# Altium schematic symbol library 2020-12-08_05-20-47.SchLib: 2 symbols
Pins are listed as number, name and electrical type; pins without a type are passive.

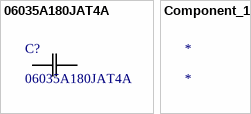
[diagram p0: symbols 06035A180JAT4A to Component_1]

## 06035A180JAT4A
designator C?
No Description Available; Built_By: EMA_UL_Team; Vendor: AVX Corporation; SourceLibrary: AVX_2016-12-14_1; Type: DEV; Manufacturer_Part_Number: 06035A180JAT4A; Copyright: Copyright (C) 2018 Accelerated Designs. All rights reserved; RefDes: RefDes
footprint CAP_0603G_AVX
pins: 1, 2

## Component_1
designator *